# Altium footprint library BMS 2S.PcbLib: 1 footprints
Each footprint in its own frame and in the unit in brackets; x right, y up, seen from the top. Pads: shape width x height; smd on the part's side, far side on the other; paste and mask are expansions set on the pad; w line width, h text height; cw(c..) or ccw(c..) is an arc to the next point about the centre after c.
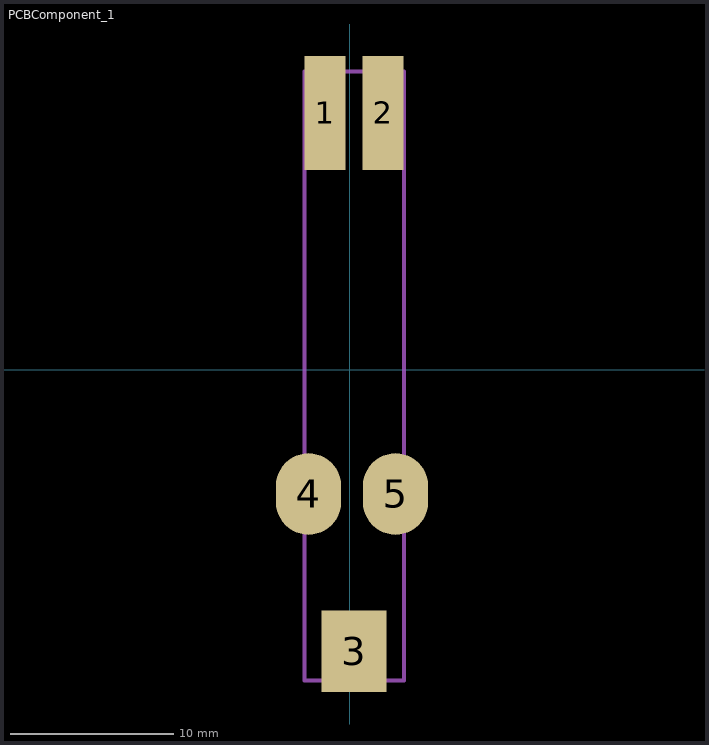
[diagram p0: the footprint, top view; thin cyan lines are the x and y axes]

## PCBComponent_1 [mm]
pads (5):
  rect 2.5x7 smd: 1(-1.524,15.748) 2(2.032,15.748)
  rect 4x5 smd: 3(0.254,-17.272)
  oval 4x5 smd: 4(-2.54,-7.62) 5(2.794,-7.62)
Mechanical 1:
  lines w0.254: -2.794,-19.05 -2.794,18.288 3.302,18.288 3.302,-19.05 -2.794,-19.05